# Altium schematic symbol library LM65645RZTR.SchLib: 1 symbol
Pins are listed as number, name and electrical type; pins without a type are passive.

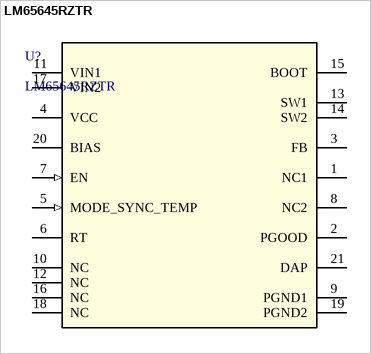
[diagram p0: symbol LM65645RZTR]

## LM65645RZTR
designator U?
3V to 65V, 4.5A synchronous step-down converter optimized for power density and low EMI 20-WQFN-FCRLF -40 to 150; Manufacturer 1: Texas Instruments; TYPE: TYPE; RefDes: RefDes; Copyright: Copyright (C) 2025 Ultra Librarian. All rights reserved.; Manufacturer Part Number 1: LM65645RZTR
footprint RZT0020A-MFG
pins: 1 NC1, 2 PGOOD (oc), 3 FB, 4 VCC, 5 MODE_SYNC_TEMP (in), 6 RT, 7 EN (in), 8 NC2, 9 PGND1 (power), 10 NC, 11 VIN1 (power), 12 NC, 13 SW1, 14 SW2, 15 BOOT, 16 NC, 17 VIN2 (power), 18 NC, 19 PGND2 (power), 20 BIAS, 21 DAP (power)